# EAGLE library part TAD5242IRGER (library TAD5242IRGER)
Audio D/A Converter ICs Hardware-control stereo audio DAC with 120dB dynamic range, and headphone and line driver Source: Datasheet <https://www.ti.com/lit/ds/symlink/tad5242.pdf?ts=1736249226355&ref_url=https%3A%2F%2Fwww.ti.com%2Fproduct%2FTAD5242>
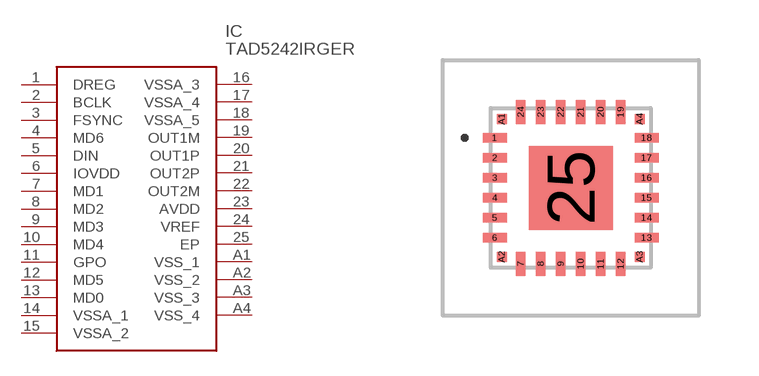
[diagram p0: symbol with the pads of TAD5242IRGER; footprint TAD5242IRGER]

Designator prefix IC

## TAD5242IRGER (Arrow_Part_Number: TAD5242IRGER; Arrow_Price-Stock: https://www.arrow.com/en/products/tad5242irger/texas-instruments?utm_currency=USD&region=nac; Description: Audio D/A Converter ICs Hardware-control stereo audio DAC with 120dB dynamic range, and headphone and line driver; Height: 1mm; Manufacturer_Name: Texas Instruments; Manufacturer_Part_Number: TAD5242IRGER; Mouser_Part_Number: 595-TAD5242IRGER; Mouser_Price-Stock: https://www.mouser.co.uk/ProductDetail/Texas-Instruments/TAD5242IRGER?qs=%252BXxaIXUDbq07iiss%252B1zA7A%3D%3D)  [TAD5242IRGER]
1  DREG
2  BCLK
3  FSYNC
4  MD6
5  DIN
6  IOVDD
7  MD1
8  MD2
9  MD3
10  MD4
11  GPO
12  MD5
13  MD0
14  VSSA_1
15  VSSA_2
16  VSSA_3
17  VSSA_4
18  VSSA_5
19  OUT1M
20  OUT1P
21  OUT2P
22  OUT2M
23  AVDD
24  VREF
25  EP
A1  VSS_1
A2  VSS_2
A3  VSS_3
A4  VSS_4

## Footprint TAD5242IRGER (pad centres in mm)
RGE0024R_2025
smd 0.6 x 0.24: 1 -1.9,1.25; 2 -1.9,0.75; 3 -1.9,0.25; 4 -1.9,-0.25; 5 -1.9,-0.75; 6 -1.9,-1.25; 13 1.9,-1.25; 14 1.9,-0.75; 15 1.9,-0.25; 16 1.9,0.25; 17 1.9,0.75; 18 1.9,1.25
smd 0.24 x 0.6: 7 -1.25,-1.9; 8 -0.75,-1.9; 9 -0.25,-1.9; 10 0.25,-1.9; 11 0.75,-1.9; 12 1.25,-1.9; 19 1.25,1.9; 20 0.75,1.9; 21 0.25,1.9; 22 -0.25,1.9; 23 -0.75,1.9; 24 -1.25,1.9
smd 2.1 x 2.1: 25 0,0
smd 0.25 x 0.25: A1 -1.725,1.725; A2 -1.725,-1.725; A3 1.725,-1.725; A4 1.725,1.725